# Altium footprint library Amin-Library.PcbLib: 601 footprints (part 33 of 38)
Each footprint in its own frame and in the unit in brackets; x right, y up, seen from the top. Pads: shape width x height; smd on the part's side, far side on the other; paste and mask are expansions set on the pad; w line width, h text height; cw(c..) or ccw(c..) is an arc to the next point about the centre after c.
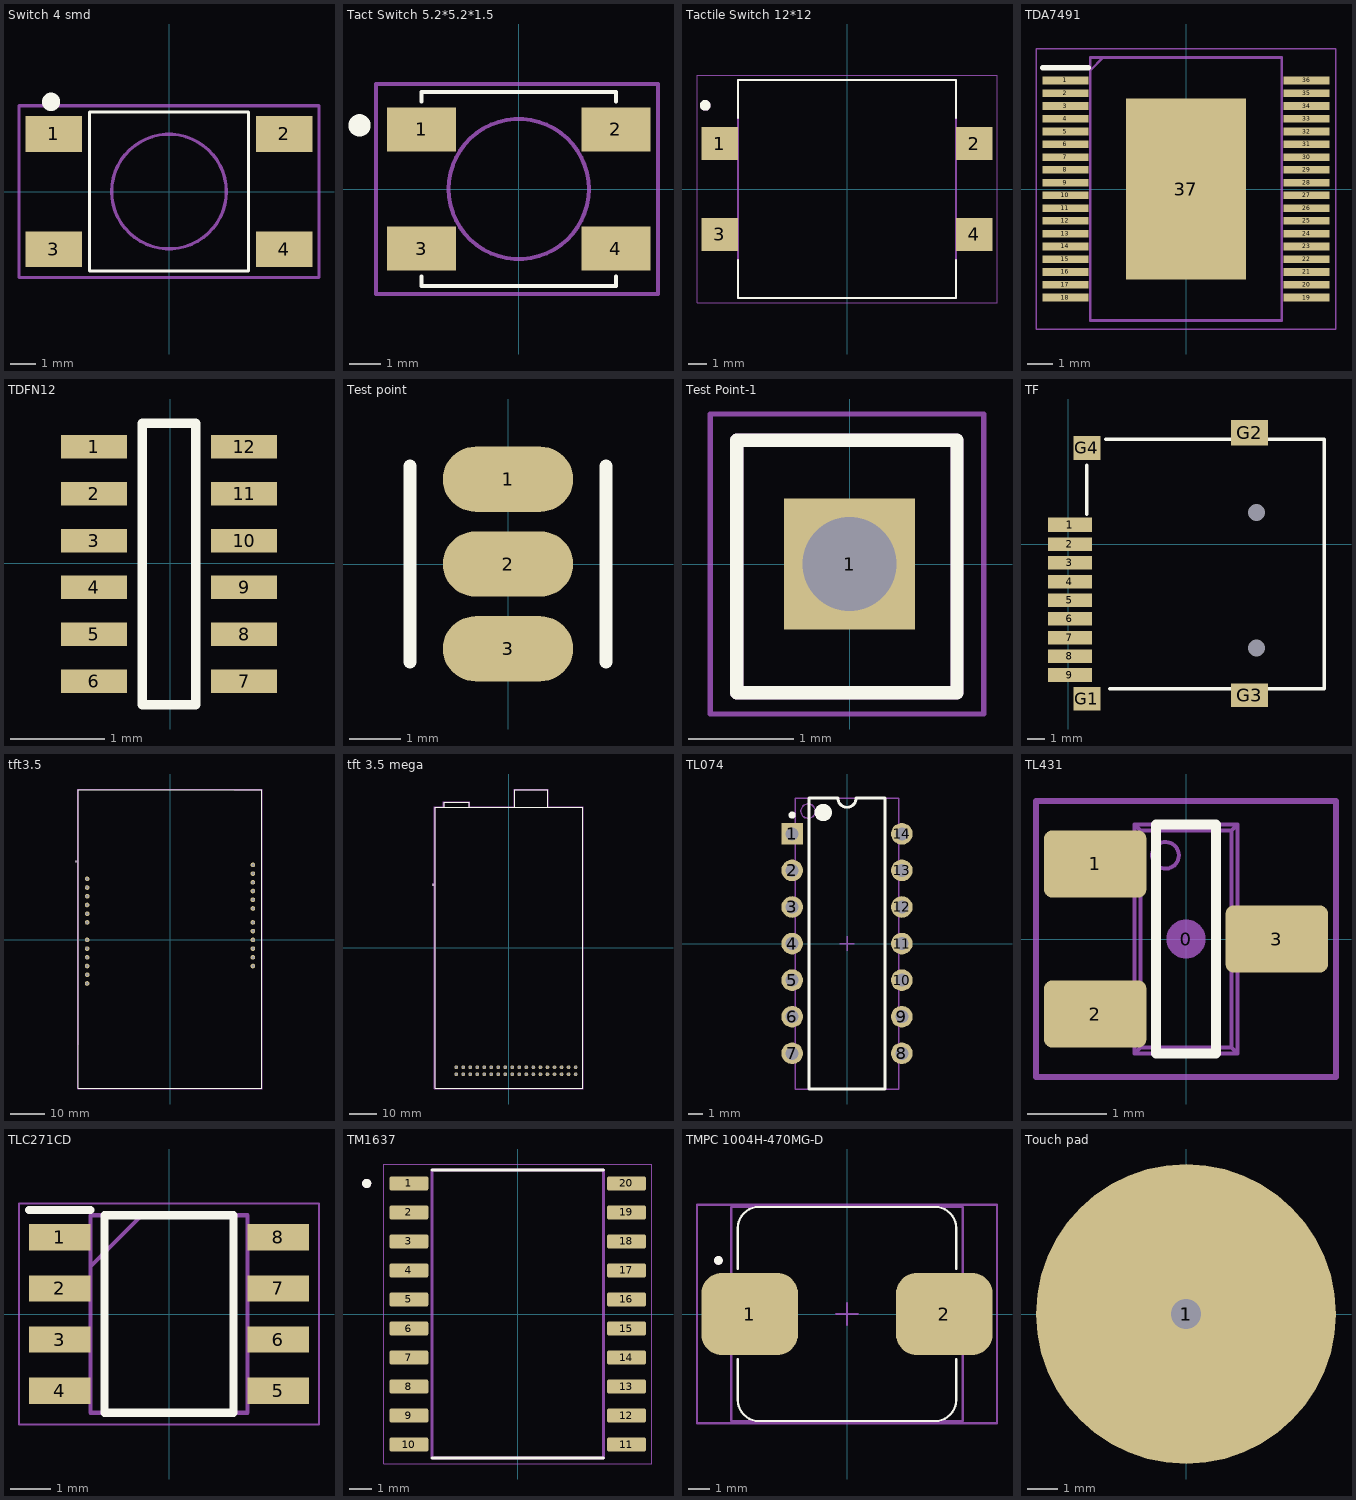
[diagram p32: the footprints below, top view; thin cyan lines are the x and y axes]

## Switch 4 smd [mm]
height 4.32
pads (4):
  rect 2.2x1.4 smd: 1(-4.5,2.25) 2(4.5,2.25) 3(-4.5,-2.25) 4(4.5,-2.25)
Top Overlay:
  circle w0.61: c-4.6,3.5 r0.05
  lines w0.127: -3.1,-3.1 3.1,-3.1 3.1,3.1 -3.1,3.1 -3.1,-3.1
Mechanical 4:
  circle w0.127: c0,0 r2.236
  circle w0.127: c0,0 r2.236
Mechanical 16:
  lines w0.127: -5.85,-3.35 5.85,-3.35 5.85,3.35 -5.85,3.35 -5.85,-3.35
3D body "User Library-TS-1150S-WP.step": height 5, standoff 0, extent -4,-3.25 4,3.25

## Tact Switch 5.2*5.2*1.5 [mm] "5.2*5.2*0.9mm"
height 4.32
pads (4):
  rect 2.2x1.4 smd: 1(-3.1,1.9) 2(3.1,1.9) 3(-3.1,-1.9) 4(3.1,-1.9)
Top Overlay:
  circle w0.61: c-5.08,2.032 r0.05
  lines w0.127: -3.1,-2.8 -3.1,-3.1 3.1,-3.1 3.1,-2.8 ; -3.1,2.8 -3.1,3.1 3.1,3.1 3.1,2.8
Mechanical 4:
  circle w0.127: c0,0 r2.236
  circle w0.127: c0,0 r2.236
Mechanical 16:
  lines w0.127: -4.55,-3.35 4.445,-3.35 4.445,3.35 -4.55,3.35 -4.55,-3.35
3D body "Ts-1252_1.5.stp": height 1.5, standoff 0, extent -3.25,-2.6 3.25,2.6

## Tactile Switch 12*12 [mm]
pads (4):
  rect 2x1.8 smd: 1(-7,2.5) 2(7,2.5) 3(-7,-2.5) 4(7,-2.5)
Top Overlay:
  circle w0.3: c-7.8,4.6 r0.141
  lines w0.127: -6,-3.9 -6,-6 6,-6 6,-3.9 ; -6,3.9 -6,6 6,6 6,3.9
Mechanical 13:
  circle w0.3: c-7.8,4.6 r0.141
  lines w0.127: -6,-6 6,-6 6,6 -6,6 -6,-6
Mechanical 15:
  lines w0.05: -8.25,-6.25 -8.25,6.25 8.25,6.25 8.25,-6.25 -8.25,-6.25
3D body "Tactal Switch - SMD (12mmx12mmx10.0mm).stp": height 10, standoff 0, extent -7.81,-6.134 7.557,5.88

## TDA7491 [mm]
height 5.33
pads (37):
  rect 1.8x0.3 smd paste-0.15: 1(-4.725,4.25) 2(-4.725,3.75) 3(-4.725,3.25) 4(-4.725,2.75) 5(-4.725,2.25) 6(-4.725,1.75) 7(-4.725,1.25) 8(-4.725,0.75) 9(-4.725,0.25) 10(-4.725,-0.25) 11(-4.725,-0.75) 12(-4.725,-1.25) 13(-4.725,-1.75) 14(-4.725,-2.25) 15(-4.725,-2.75) 16(-4.725,-3.25) 17(-4.725,-3.75) 18(-4.725,-4.25) 19(4.725,-4.25) 20(4.725,-3.75) 21(4.725,-3.25) 22(4.725,-2.75) 23(4.725,-2.25) 24(4.725,-1.75) 25(4.725,-1.25) 26(4.725,-0.75) 27(4.725,-0.25) 28(4.725,0.25) 29(4.725,0.75) 30(4.725,1.25) 31(4.725,1.75) 32(4.725,2.25) 33(4.725,2.75) 34(4.725,3.25) 35(4.725,3.75) 36(4.725,4.25)
  rect 4.7x7.1 smd: 37(0,0)
Top Overlay:
  lines w0.2: -5.625,4.75 -3.825,4.75
Top Paste:
  rectangle: 3.825,3.625 5.625,3.875
  rectangle: 3.825,3.125 5.625,3.375
  rectangle: 3.825,2.625 5.625,2.875
  rectangle: 3.825,2.125 5.625,2.375
  rectangle: 3.825,1.625 5.625,1.875
  rectangle: 3.825,1.125 5.625,1.375
  rectangle: 3.825,0.625 5.625,0.875
  rectangle: 3.825,0.125 5.625,0.375
  rectangle: 3.825,-0.375 5.625,-0.125
  rectangle: 3.825,-0.875 5.625,-0.625
  rectangle: 3.825,-1.375 5.625,-1.125
  rectangle: 3.825,-1.875 5.625,-1.625
  rectangle: 3.825,-2.375 5.625,-2.125
  rectangle: 3.825,-2.875 5.625,-2.625
  rectangle: 3.825,-3.375 5.625,-3.125
  rectangle: 3.825,-3.875 5.625,-3.625
  rectangle: 3.825,-4.375 5.625,-4.125
  rectangle: 3.825,4.125 5.625,4.375
  rectangle: -5.625,4.125 -3.825,4.375
  rectangle: -5.625,-4.375 -3.825,-4.125
  rectangle: -5.625,-3.875 -3.825,-3.625
  rectangle: -5.625,-3.375 -3.825,-3.125
  rectangle: -5.625,-2.875 -3.825,-2.625
  rectangle: -5.625,-2.375 -3.825,-2.125
  rectangle: -5.625,-1.875 -3.825,-1.625
  rectangle: -5.625,-1.375 -3.825,-1.125
  rectangle: -5.625,-0.875 -3.825,-0.625
  rectangle: -5.625,-0.375 -3.825,-0.125
  rectangle: -5.625,0.125 -3.825,0.375
  rectangle: -5.625,0.625 -3.825,0.875
  rectangle: -5.625,1.125 -3.825,1.375
  rectangle: -5.625,1.625 -3.825,1.875
  rectangle: -5.625,2.125 -3.825,2.375
  rectangle: -5.625,2.625 -3.825,2.875
  rectangle: -5.625,3.125 -3.825,3.375
  rectangle: -5.625,3.625 -3.825,3.875
Mechanical 13:
  lines w0.1: -3.75,4.65 -3.25,5.15 ; -3.75,-5.15 3.75,-5.15 3.75,5.15 -3.75,5.15 -3.75,-5.15
Mechanical 15:
  lines w0.05: -5.875,-5.5 5.875,-5.5 5.875,5.5 -5.875,5.5 -5.875,-5.5
3D body "TDA7491HV13TR.stp": height 2.47, standoff 0, extent -5.15,-5.15 5.15,5.15

## TDFN12 [mm]
pads (12):
  rect 0.7x0.25 smd: 1(-0.813,1.245) 2(-0.813,0.745) 3(-0.813,0.245) 4(-0.813,-0.255) 5(-0.813,-0.755) 6(-0.813,-1.255) 7(0.787,-1.255) 8(0.787,-0.755) 9(0.787,-0.255) 10(0.787,0.245) 11(0.787,0.745) 12(0.787,1.245)
Top Overlay:
  lines w0.1: -0.138,1.495 0.272,1.495 0.272,-1.505 -0.298,-1.505 -0.298,1.495 0.112,1.495
  text "." at -0.635,1.778 h0.2

## Test point [mil] "Test point 3 oads"
pads (3):
  oval 100x50 smd: 1(0,65) 2(0,0) 3(0,-65)
Top Overlay:
  lines w10: -75,-75 -75,75 ; 75,-75 75,75

## Test Point-1 [mm]
pads (1):
  rect 1.24x1.24 hole 0.89: 1(0,0)
Top Overlay:
  lines w0.127: -1.07,-1.22 -1.07,1.17 1.016,1.17 1.016,-1.22 -1.07,-1.22
Mechanical 4:
  lines w0.127: -1.07,-1.17 -1.07,1.17 ; 1.016,-1.17 1.016,1.17 -1.07,1.17 ; -1.07,1.17 0.989,1.17 1.016,1.143 1.016,-1.22 -1.07,-1.22 -1.07,1.17
Mechanical 16:
  lines w0.05: -1.32,-1.42 -1.32,1.42 1.27,1.42 1.27,-1.42 -1.32,-1.42

## TF [mm]
pads (15):
  rect 2.6x0.85 smd: 1(0.088,1.143)
  rect 2.6x0.8 smd: 2(0.088,0.002) 3(0.088,-1.101) 4(0.088,-2.204) 5(0.088,-3.307) 6(0.088,-4.411) 7(0.088,-5.514) 8(0.088,-6.617) 9(0.088,-7.72)
  round 0 hole 1: 11(11.088,1.88) 12(11.088,-6.12)
  rect 1.6x1.4 smd: G1(1.088,-9.12) G4(1.088,5.68)
  rect 2.2x1.5 smd: G2(10.688,6.58)
  rect 2.2x1.4 smd: G3(10.688,-8.92)
Top Overlay:
  lines w0.203: 1.088,1.751 1.088,4.672 ; 2.198,6.18 15.088,6.18 15.088,-8.52 2.452,-8.52

## tft3.5 [mm]
pads (24):
  round 1.358 hole 0.85: 3V3(-24.13,15.24) 5V(-24.13,12.7) GND(-24.13,7.62) GND(-24.13,10.16) LCD_CS(-24.13,-7.62) LCD_D0(24.13,9.144) LCD_D1(24.13,11.684) LCD_D2(24.13,-7.62) LCD_D3(24.13,-5.08) LCD_D4(24.13,-2.54) LCD_D5(24.13,0) LCD_D6(24.13,2.54) LCD_D7(24.13,5.08) LCD_F_CS(-24.13,-12.7) LCD_RD(-24.13,0) LCD_RS(-24.13,-5.08) LCD_RST(-24.13,-10.16) LCD_WR(-24.13,-2.54) SD_DI(24.13,16.764) SD_DO(24.13,19.304) SD_SCK(24.13,21.844) SD_SS(24.13,14.224) ""(-24.13,5.08) ""(-24.13,17.78)
Top Overlay:
  circle w0.24: c-27.4,22.81 r0.12
  lines w0.127: -26.67,-43.18 26.67,-43.18 26.67,43.688 -26.67,43.688 -26.67,-43.18
Mechanical 4:
  circle w0.24: c-27.4,22.81 r0.12
  circle w0.24: c-27.4,22.81 r0.12
  lines w0.127: 26.67,43.688 18.923,43.688 26.67,43.688 ; 26.67,43.688 26.67,-30.353 26.67,43.688 ; -26.67,-43.18 26.67,-43.18 -26.67,-43.18 ; -26.67,-30.353 -26.67,43.688 -26.67,-30.353
Mechanical 16:
  lines w0.05: -26.924,-43.434 26.92,-43.434 26.92,43.942 ; -26.92,-43.434 -26.92,43.942 26.924,43.942
3D body "User Library-3_5TFT-1.STEP": height 8.89, standoff -5.99, extent -28.29,-40.658 27.94,43.706

## tft 3.5 mega [mm]
pads (36):
  round 1.358 hole 0.85: 5V_2(24.13,-43.18) 5V_3(24.13,-45.72) 22(21.59,-43.18) 23(21.59,-45.72) 24(19.05,-43.18) 25(19.05,-45.72) 26(16.51,-43.18) 27(16.51,-45.72) 28(13.97,-43.18) 29(13.97,-45.72) 30(11.43,-43.18) 31(11.43,-45.72) 32(8.89,-43.18) 33(8.89,-45.72) 34(6.35,-43.18) 35(6.35,-45.72) 36(3.81,-43.18) 37(3.81,-45.72) 38(1.27,-43.18) 39(1.27,-45.72) 40(-1.27,-43.18) 41(-1.27,-45.72) 42(-3.81,-43.18) 43(-3.81,-45.72) 44(-6.35,-43.18) 45(-6.35,-45.72) 46(-8.89,-43.18) 47(-8.89,-45.72) 48(-11.43,-43.18) 49(-11.43,-45.72) 50(-13.97,-43.18) 51(-13.97,-45.72) 52(-16.51,-43.18) 53(-16.51,-45.72) GND4(-19.05,-43.18) GND5(-19.05,-45.72)
Top Overlay:
  circle w0.24: c-27.4,22.81 r0.12
  lines w0.127: -23.37,50.8 -23.37,52.61 -14.378,52.61 -14.378,50.8 ; -23.37,50.8 -14.378,50.8 ; -23.37,50.8 -26.67,50.8 -26.67,-50.8 26.67,-50.8 26.67,50.8 14.02,50.8 ; -14.378,50.8 2.22,50.8 ; 2.22,50.8 2.22,57.15 14.02,57.15 14.02,50.8 ; 2.22,50.8 14.02,50.8
Mechanical 4:
  circle w0.24: c-27.4,22.81 r0.12
  circle w0.24: c-27.4,22.81 r0.12
  lines w0.127: -26.67,-50.8 -26.67,50.8 ; -26.67,-50.8 26.67,-50.8 ; -26.67,-50.8 -26.67,50.8 ; -26.67,-50.8 26.67,-50.8 ; -26.67,50.8 -23.37,50.8 ; -26.67,50.8 -23.37,50.8 ; -23.37,50.8 -23.37,52.61 ; -23.37,50.8 -23.37,52.61 ; -23.37,50.8 -14.378,50.8 ; -23.37,50.8 -14.378,50.8 ; -23.37,52.61 -14.378,52.61 ; -23.37,52.61 -14.378,52.61 ; -14.378,50.8 -14.378,52.61 ; -14.378,50.8 -14.378,52.61 ; -14.378,50.8 2.22,50.8 ; -14.378,50.8 2.22,50.8 ; 2.22,50.8 2.22,57.15 ; 2.22,50.8 2.22,57.15 ; 2.22,50.8 14.02,50.8 ; 2.22,50.8 14.02,50.8 ; 2.22,57.15 14.02,57.15 ; 2.22,57.15 14.02,57.15 ; 14.02,50.8 14.02,57.15 ; 14.02,50.8 14.02,57.15 ; 14.02,50.8 26.67,50.8 ; 14.02,50.8 26.67,50.8 ; 26.67,-50.8 26.67,50.8 ; 26.67,-50.8 26.67,50.8
Mechanical 16:
  lines w0.05: -26.92,-51.05 -26.92,51.05 -23.62,51.05 -23.62,52.86 -14.128,52.86 -14.128,51.05 1.97,51.05 1.97,57.4 14.27,57.4 14.27,51.05 26.92,51.05 26.92,-51.05 -26.92,-51.05

## TL074 [mm] "DIP; 14 Leads; Row Spacing 7.62 mm; Pitch 2.54 mm"
height 5.08
pads (14):
  rect 1.5x1.5 hole 0.9: 1(-3.81,7.62)
  round 1.5 hole 0.9: 2(-3.81,5.08) 3(-3.81,2.54) 4(-3.81,0) 5(-3.81,-2.54) 6(-3.81,-5.08) 7(-3.81,-7.62) 8(3.81,-7.62) 9(3.81,-5.08) 10(3.81,-2.54) 11(3.81,0) 12(3.81,2.54) 13(3.81,5.08) 14(3.81,7.62)
Top Overlay:
  circle w0.6: c-1.65,9.1 r0.3
  circle w0.25: c-3.81,8.92 r0.125
  lines w0.2: -2.65,-10.1 2.65,-10.1 2.65,10.1 0.635,10.1 cw(c0,10.1) -0.635,10.1 -2.65,10.1 -2.65,-10.1
Mechanical 13:
  circle w0.1: c-2.7,9.2 r0.5
  lines w0.1: -3.6,-10.1 3.6,-10.1 3.6,10.1 -3.6,10.1 -3.6,-10.1
Mechanical 15:
  lines w0.1: -0.5,0 0.5,0 ; 0,-0.5 0,0.5
3D body: height 5.08, standoff 0, extent -3.6,-10.1 3.6,10.1

## TL431 [mm] "SOT23, 3 pin"
height 1.003
pads (4):
  round 0.5 on Mech15: 0(0,0)
  rrect25% 1.3x0.85 smd: 1(-1.15,0.95) 2(-1.15,-0.95) 3(1.15,0)
Top Overlay:
  lines w0.127: -0.381,-1.45 -0.381,1.45 0.381,1.45 0.381,-1.45 -0.381,-1.45
  text "." at -2.125,0.95 h1.4
Mechanical 13:
  circle w0.05: c-0.26,1.06 r0.169
  lines w0.05: -1.19,-1.19 -1.19,-0.71 ; -1.19,0.71 -1.19,1.19 ; -1.099,-1.19 -1.099,-0.71 ; -1.099,0.71 -1.099,1.19 ; -1.074,-1.19 -1.074,-0.71 ; -1.074,0.71 -1.074,1.19 ; -0.825,-1.19 -0.825,-0.71 ; -0.825,0.71 -0.825,1.19 ; -0.65,-1.19 -1.4,-1.19 -1.4,-0.71 -0.65,-0.71 ; -0.65,0.71 -1.4,0.71 -1.4,1.19 -0.65,1.19 ; 0.65,-0.24 1.4,-0.24 1.4,0.24 0.65,0.24 ; 0.825,-0.24 0.825,0.24 ; 1.074,-0.24 1.074,0.24 ; 1.099,-0.24 1.099,0.24 ; 1.19,-0.24 1.19,0.24 ; -0.65,-1.45 0.65,-1.45 ; -0.65,-1.45 -0.65,1.45 ; -0.65,-1.45 -0.576,-1.376 ; -0.65,1.45 -0.576,1.376 ; -0.65,1.45 0.65,1.45 ; -0.576,-1.376 0.576,-1.376 ; -0.576,-1.376 -0.576,1.376 ; -0.576,1.376 0.576,1.376 ; 0.576,-1.376 0.65,-1.45 ; 0.576,-1.376 0.576,1.376 ; 0.576,1.376 0.65,1.45 ; 0.65,-1.45 0.65,1.45
Mechanical 15:
  lines w0.076: -1.9,-1.75 -1.9,1.75 1.9,1.75 1.9,-1.75 -1.9,-1.75
3D body "SOT23-3.STEP": height 1.29, standoff -0.01, extent -1.4,-1.45 1.4,1.45

## TLC271CD [mm]
pads (8):
  rect 1.528x0.65 smd: 1(-2.711,1.905) 2(-2.711,0.635) 3(-2.711,-0.635) 4(-2.711,-1.905) 5(2.711,-1.905) 6(2.711,-0.635) 7(2.711,0.635) 8(2.711,1.905)
Top Overlay:
  lines w0.2: -3.475,2.58 -1.948,2.58 ; -1.598,-2.452 1.598,-2.452 1.598,2.452 -1.598,2.452 -1.598,-2.452
Mechanical 13:
  lines w0.1: -1.948,1.182 -0.678,2.452 ; -1.948,-2.452 1.948,-2.452 1.948,2.452 -1.948,2.452 -1.948,-2.452
Mechanical 15:
  lines w0.05: -3.725,-2.75 3.725,-2.75 3.725,2.75 -3.725,2.75 -3.725,-2.75
3D body "TLC271CD.stp": height 1.75, standoff 0, extent -2.997,-2.452 2.997,2.452

## TM1637 [mm] "SOP20"
height 2.55
pads (20):
  rrect25% 1.7x0.61 smd: 1(-4.76,5.715) 2(-4.76,4.445) 3(-4.76,3.175) 4(-4.76,1.905) 5(-4.76,0.635) 6(-4.76,-0.635) 7(-4.76,-1.905) 8(-4.76,-3.175) 9(-4.76,-4.445) 10(-4.76,-5.715) 11(4.76,-5.715) 12(4.76,-4.445) 13(4.76,-3.175) 14(4.76,-1.905) 15(4.76,-0.635) 16(4.76,0.635) 17(4.76,1.905) 18(4.76,3.175) 19(4.76,4.445) 20(4.76,5.715)
Top Overlay:
  circle w0.2: c-6.61,5.715 r0.1
  lines w0.127: -3.75,-6.3 3.75,-6.3 ; -3.75,6.3 3.75,6.3
Mechanical 13:
  circle w0.2: c-6.61,5.715 r0.1
  lines w0.127: -3.75,-6.3 -3.75,6.3 3.75,6.3 3.75,-6.3 -3.75,-6.3
Mechanical 15:
  lines w0.05: -5.86,-6.55 5.86,-6.55 5.86,6.55 -5.86,6.55 -5.86,-6.55
3D body "step_temp.STEP": height 2.55, standoff 0, extent -5.175,-6.3 5.175,6.3

## TMPC 1004H-470MG-D [mm]
pads (2):
  rrect50% 4.51x3.85 smd mask+0.05: 1(-4.545,0) 2(4.545,0)
Top Overlay:
  circle w0.21: c-6,2.5 r0.1
  lines w0.1: -5.1,-2.1 -5.1,-4 ccw(c-4.1,-4) -4.1,-5 4.1,-5 ccw(c4.1,-4) 5.1,-4 5.1,-2.1 ; -5.1,2.1 -5.1,4 cw(c-4.1,4) -4.1,5 4.1,5 cw(c4.1,4) 5.1,4 5.1,2.1
Mechanical 13:
  circle w0.21: c-6,2.5 r0.1
  lines w0.1: 5.4,2.1 5.4,5 5.1,5 -5.4,5 -5.4,3.5 -5.4,-5 5.4,-5 5.4,-3.3 5.4,2.4
Mechanical 15:
  lines w0.1: -0.5,0 0.5,0 ; 0,-0.5 0,0.5 ; -7,-5.1 -7,1.4 -7,5.1 7,5.1 7,-5.1 -5.2,-5.1 -7,-5.1
3D body "ETQP4M6R8KVC.STEP": height 4.01, standoff 0.01, extent -5.4,-5 5.4,5

## Touch pad [mm]
pads (2):
  round 1 hole 1: 1(0,0)
  round 10 smd paste+0: 1(0,0)